# Altium integrated library FH12-30S-0.5SH_55_.IntLib: 1 symbol
Pins are listed as number, name and electrical type; pins without a type are passive.

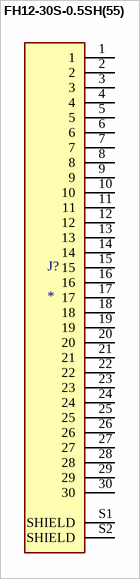
[diagram p0: symbol FH12-30S-0.5SH(55)]

## FH12-30S-0.5SH(55)
designator J?
30 Position FFC, FPC Connector Contacts, Bottom 0.020 (0.50mm) Surface Mount, Right Angle; MF: Hirose Connector; MP: FH12-30S-0.5SH(55); SnapEDA_Link: https://www.snapeda.com/parts/FH12-30S-0.5SH(55)/Hirose/view-part/?ref=snap; Package: None; Value: *; Check_prices: https://www.snapeda.com/parts/FH12-30S-0.5SH(55)/Hirose/view-part/?ref=eda
footprint HIROSE_FH12-30S-0.5SH(55)
pins: 1, 2, 3, 4, 5, 6, 7, 8, 9, 10, 11, 12, 13, 14, 15, 16, 17, 18, 19, 20, 21, 22, 23, 24, 25, 26, 27, 28, 29, 30, S1 SHIELD, S2 SHIELD